# Altium schematic symbol library UA79M05CKCS.SchLib: 1 symbol
Pins are listed as number, name and electrical type; pins without a type are passive.

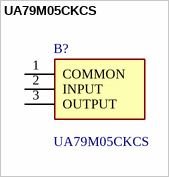
[diagram p0: symbol UA79M05CKCS]

## UA79M05CKCS
designator B?
1.5-A, -25-V, Negative Linear Voltage Regulators; Manufacturer_Name: Texas Instruments; Geometry.Height: 4.7mm; Mouser Part Number: 595-UA79M05CKCS; Mouser Price/Stock: https://www.mouser.co.uk/ProductDetail/Texas-Instruments/UA79M05CKCS?qs=vxEfx8VrU7Bl9DiJ%2FviIGA%3D%3D; Manufacturer_Part_Number: UA79M05CKCS; Datasheet Link: http://www.ti.com/lit/gpn/ua79m
footprint TO254P470X1016X1965-3P
pins: 1 COMMON, 2 INPUT, 3 OUTPUT